# EAGLE library part XFMR-600 (library xport-v92-audiobridge)
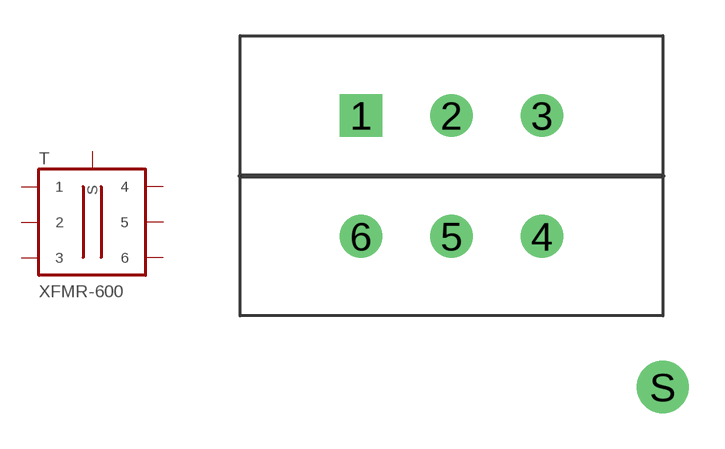
[diagram p0: symbol with the pads of XFMR-600; footprint XFMR-600]

Designator prefix T

## XFMR-600  [XFMR-600]
1  1  pas
2  2  pas
3  3  pas
4  4  pas
5  5  pas
6  6  pas
S  S  pas

## Footprint XFMR-600 (pad centres in mm)
600:600 ohm telecom audio transformer, wet, shielded can, 6 pin + shield
drill 1 pad 1.8 square: 1 -3.81,2.54
drill 1 pad 1.8: 2 0,2.54; 3 3.81,2.54; 4 3.81,-2.54; 5 0,-2.54; 6 -3.81,-2.54
drill 1.2 pad 2.2: S 8.89,-8.89